# Altium schematic symbol library Schlib1.SchLib: 31 symbols
Pins are listed as number, name and electrical type; pins without a type are passive.

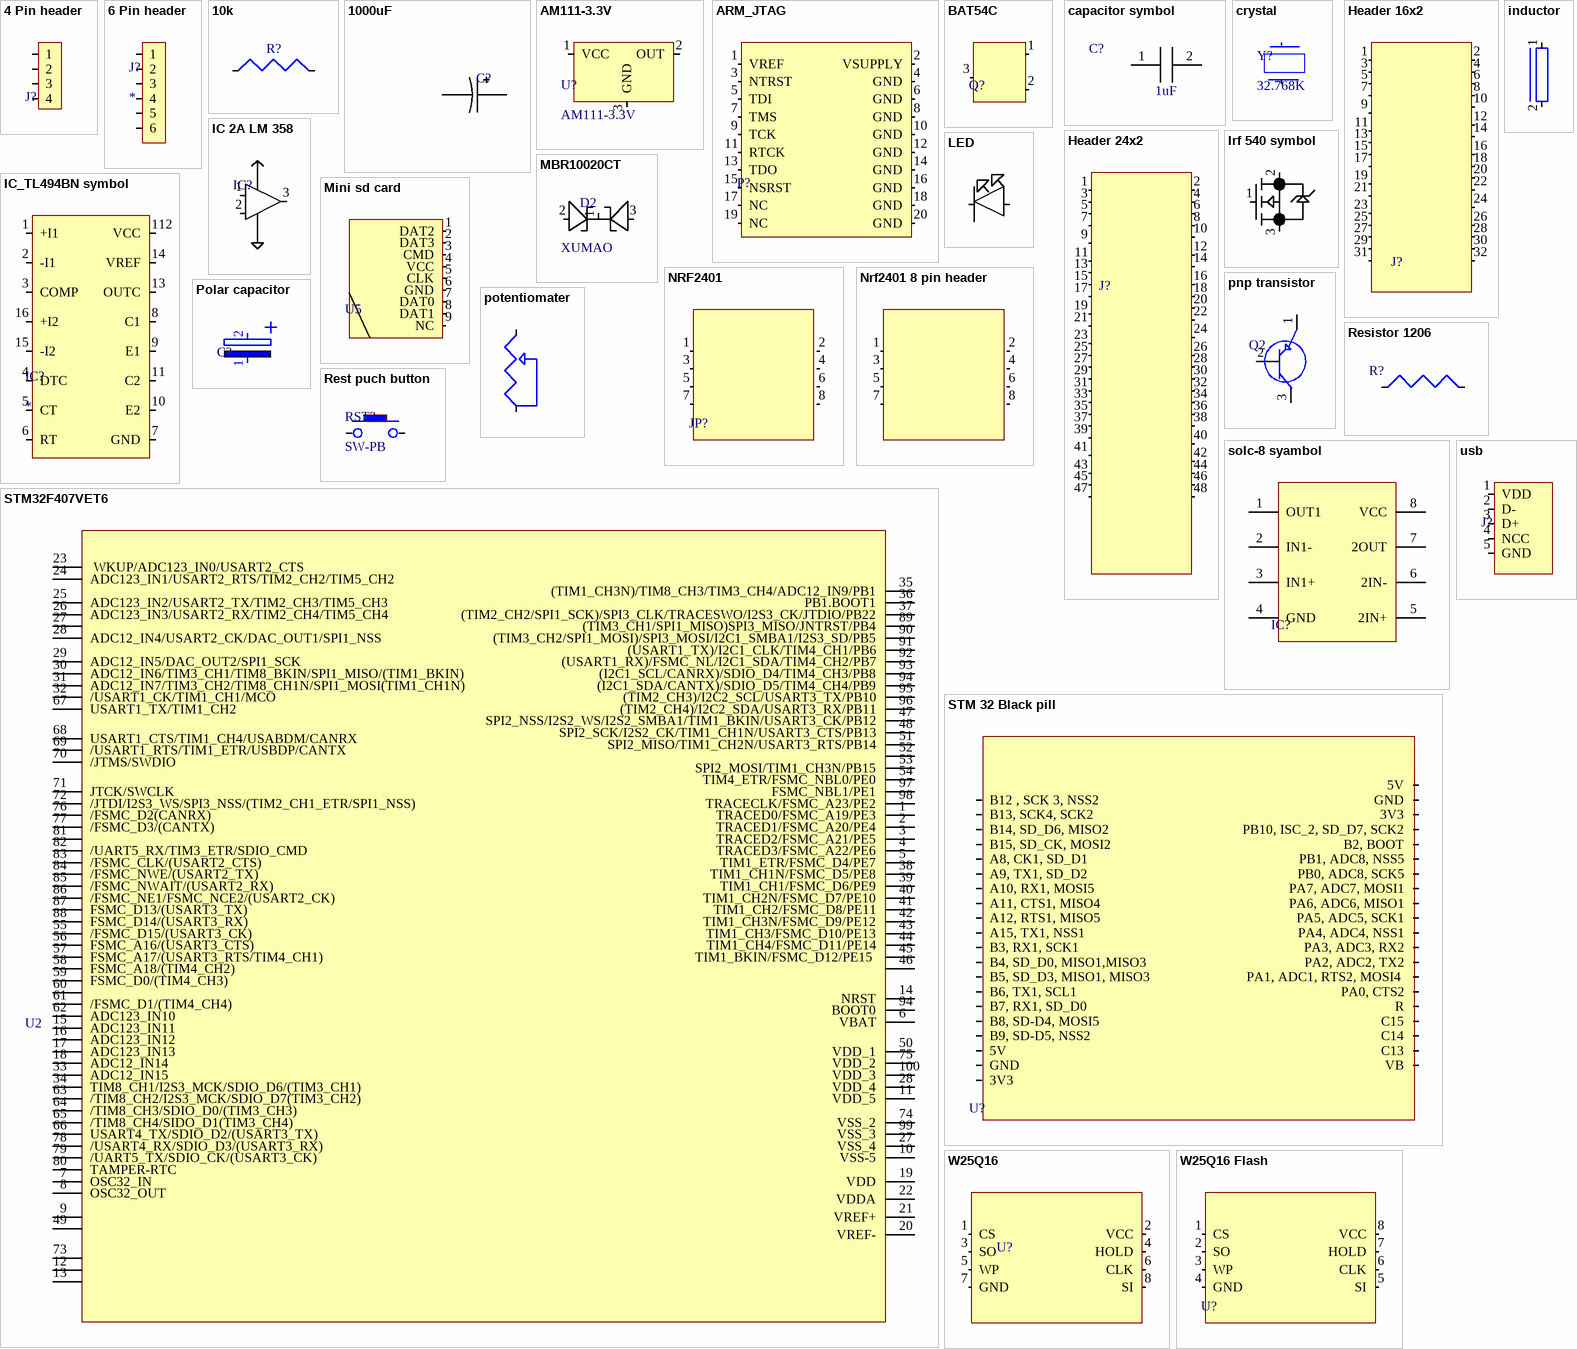
[diagram p0: symbols 4 Pin header to W25Q16 Flash]

## 4 Pin header
designator J?, comment hg  (value not drawn)
footprint 4 pin Headeer stm32
pins: 1, 2, 3, 4

## 6 Pin header
designator J?
footprint 6 pin header STM32
pins: 1, 2, 3, 4, 5, 6

## 10k
designator R?
footprint Resistor
pins: 1, 2

## 1000uF
designator C?
footprint capacitor
pins: 1, 2

## AM111-3.3V
designator U?
footprint AMS1117-3.3V
pins: 1 VCC, 2 OUT, 3 GND

## ARM_JTAG
designator P?, comment 1  (value not drawn)
footprint ARM_JTAG
pins: 1 VREF, 2 VSUPPLY, 3 NTRST, 4 GND, 5 TDI, 6 GND, 7 TMS, 8 GND, 9 TCK, 10 GND, 11 RTCK, 12 GND, 13 TDO, 14 GND, 15 NSRST, 16 GND, 17 NC, 18 GND, 19 NC, 20 GND

## BAT54C
designator Q?, comment 1  (value not drawn)
footprint BAT54C
pins: 1 9, 2, 3 11

## capacitor symbol
designator C?  value 1uF
footprint capacitor
pins: 1, 2

## crystal
designator Y?, comment 32.768K
footprint Crystal
pins: 1, 2

## Header 16x2
designator J?, comment 1  (value not drawn)
footprint Header 16x2
pins: 1, 2, 3, 4, 5, 6, 7, 8, 9, 10, 11, 12, 13, 14, 15, 16, 17, 18, 19, 20, 21, 22, 23, 24, 25, 26, 27, 28, 29, 30, 31, 32

## Header 24x2
designator J?, comment 1  (value not drawn)
footprint Header 24x2
pins: 1, 2, 3, 4, 5, 6, 7, 8, 9, 10, 11, 12, 13, 14, 15, 16, 17, 18, 19, 20, 21, 22, 23, 24, 25, 26, 27, 28, 29, 30, 31, 32, 33, 34, 35, 36, 37, 38, 39, 40, 41, 42, 43, 44, 45, 46, 47, 48

## IC 2A LM 358
designator IC?
Manufacturer: MSKSEMI; Manuf. part #: LM358; Pakage: SOP-8; lcsc part #: C5252902
footprint IC-2A-LM358
pins: 1, 2, 3

## IC_TL494BN symbol
designator IC?
Manufacturer: JSMSEMI; Manufacture part #: TL494; Pakage: SOP-16; lcsc part #: C5356108
footprint TL494BN
pins: 1 +I1, 2 -I1, 3 COMP, 4 DTC, 5 CT, 6 RT, 7 GND, 8 C1, 9 E1, 10 E2, 11 C2, 13 OUTC, 14 VREF, 15 -I2, 16 +I2, 112 VCC

## inductor
designator ?
footprint capacitor
pins: 1, 2

## Irf 540 symbol
designator ?
Mfr. Part #: IRF540NPBF; Manufacturer: Infineon; LCSC Part #: C2566; Package: TO-220AB
footprint IRF 540 through hole
pins: 1, 2, 3

## LED
designator L?
footprint LED
pins: 1, 2

## MBR10020CT
designator D2  Manufacturer: XUMAO  (hidden comment: *)
Mfr. Part #: MBR10200CT; LCSC Part #: C22447875; Package: TO-220AB
footprint IRF 540 through hole
pins: 1, 2, 3

## Mini sd card
designator U5, comment 1  (value not drawn)
footprint SD card reader connector
pins: 1 DAT2, 2 DAT3, 3 CMD, 4 VCC, 5 CLK, 6 GND, 7 DAT0, 8 DAT1, 9 NC

## NRF2401
designator JP?, comment 1  (value not drawn)
footprint 8 pin header
pins: 1 VREF, 2 VSUPPLY, 3 NTRST, 4 GND, 5 TDI, 6 GND, 7 TMS, 8 GND

## Nrf2401 8 pin header
designator JP?  (value not drawn)
footprint 8 pin header
pins: 1 VREF, 2 VSUPPLY, 3 NTRST, 4 GND, 5 TDI, 6 GND, 7 TMS, 8 GND

## pnp transistor
designator Q2, comment 2  (value not drawn)
footprint pnp transistor
pins: 1, 2, 3

## Polar capacitor
designator C?, comment 1  (value not drawn)
footprint capacitor
pins: 1, 2

## potentiomater
designator ?
Mfr. Part #: *AD5262BRUZ20-RL7; Manu: ADI; LCSC Part #: C578157; Package: *
footprint Resistor
pins: 1, 2

## Resistor 1206
designator R?
Manuf: YAGEO; Mfr. Part #: RC1206FR-0710KL; Seller Part #: C132649; Seller: LCSC; Package: 1206
footprint Resistor
pins: 1, 2

## Rest puch button
designator RST?, comment SW-PB
footprint reset push button single
pins: 1, 2

## solc-8 syambol
designator IC?
footprint SOIC-8
pins: 1 OUT1, 2 IN1-, 3 IN1+, 4 GND, 5 2IN+, 6 2IN-, 7 2OUT, 8 VCC

## STM32F407VET6
designator U2, comment 1  (value not drawn)
footprint STM32F407VET6
pins: 1 TRACED0/FSMC_A19/PE3, 2 TRACED1/FSMC_A20/PE4, 3 TRACED2/FSMC_A21/PE5, 4 TRACED3/FSMC_A22/PE6, 5 TIM1_ETR/FSMC_D4/PE7, 6 VBAT, 7 OSC32_IN, 8 OSC32_OUT, 9, 10 VSS-5, 11 VDD_5, 12, 13, 14 NRST, 15 ADC123_IN11, 16 ADC123_IN12, 17 ADC123_IN13, 18 ADC12_IN14, 19 VDD, 20 VREF-, 21 VREF+, 22 VDDA, 23  WKUP/ADC123_IN0/USART2_CTS, 24 ADC123_IN1/USART2_RTS/TIM2_CH2/TIM5_CH2, 25 ADC123_IN2/USART2_TX/TIM2_CH3/TIM5_CH3, 26 ADC123_IN3/USART2_RX/TIM2_CH4/TIM5_CH4, 27 VSS_4, 27, 28 VDD_4, 28 ADC12_IN4/USART2_CK/DAC_OUT1/SPI1_NSS, 29 ADC12_IN5/DAC_OUT2/SPI1_SCK, 30 ADC12_IN6/TIM3_CH1/TIM8_BKIN/SPI1_MISO/(TIM1_BKIN), 31 ADC12_IN7/TIM3_CH2/TIM8_CH1N/SPI1_MOSI(TIM1_CH1N), 32 /USART1_CK/TIM1_CH1/MCO, 33 ADC12_IN15, 34 TIM8_CH1/I2S3_MCK/SDIO_D6/(TIM3_CH1), 35 (TIM1_CH3N)/TIM8_CH3/TIM3_CH4/ADC12_IN9/PB1, 36 PB1.BOOT1, 37 (TIM2_CH2/SPI1_SCK)/SPI3_CLK/TRACESWO/I2S3_CK/JTDIO/PB22, 38 TIM1_CH1N/FSMC_D5/PE8, 39 TIM1_CH1/FSMC_D6/PE9, 40 TIM1_CH2N/FSMC_D7/PE10, 41 TIM1_CH2/FSMC_D8/PE11, 42 TIM1_CH3N/FSMC_D9/PE12, 43 TIM1_CH3/FSMC_D10/PE13, 44 TIM1_CH4/FSMC_D11/PE14, 45 TIM1_BKIN/FSMC_D12/PE15 , 46, 47 SPI2_NSS/I2S2_WS/I2S2_SMBA1/TIM1_BKIN/USART3_CK/PB12, 48 SPI2_SCK/I2S2_CK/TIM1_CH1N/USART3_CTS/PB13, 49, 50 VDD_1, 51 SPI2_MISO/TIM1_CH2N/USART3_RTS/PB14, 52, 53 SPI2_MOSI/TIM1_CH3N/PB15, 54 TIM4_ETR/FSMC_NBL0/PE0, 55 /FSMC_D15/(USART3_CK), 56 FSMC_A16/(USART3_CTS), 57 FSMC_A17/(USART3_RTS/TIM4_CH1), 58 FSMC_A18/(TIM4_CH2), 59 FSMC_D0/(TIM4_CH3), 60, 61 /FSMC_D1/(TIM4_CH4), 62 ADC123_IN10, 63 /TIM8_CH2/I2S3_MCK/SDIO_D7(TIM3_CH2), 64 /TIM8_CH3/SDIO_D0/(TIM3_CH3), 65 /TIM8_CH4/SIDO_D1(TIM3_CH4), 66 USART4_TX/SDIO_D2/(USART3_TX), 67 USART1_TX/TIM1_CH2, 68 USART1_CTS/TIM1_CH4/USABDM/CANRX, 69 /USART1_RTS/TIM1_ETR/USBDP/CANTX, 70 /JTMS/SWDIO, 71 JTCK/SWCLK, 72 /JTDI/I2S3_WS/SPI3_NSS/(TIM2_CH1_ETR/SPI1_NSS), 73, 74 VSS_2, 75 VDD_2, 76 /FSMC_D2(CANRX), 77 /FSMC_D3/(CANTX), 78 /USART4_RX/SDIO_D3/(USART3_RX), 79 /UART5_TX/SDIO_CK/(USART3_CK), 80 TAMPER-RTC, 81, 82 /UART5_RX/TIM3_ETR/SDIO_CMD, 83 /FSMC_CLK/(USART2_CTS), 84 /FSMC_NWE/(USART2_TX), 85 /FSMC_NWAIT/(USART2_RX), 86 /FSMC_NE1/FSMC_NCE2/(USART2_CK), 87 FSMC_D13/(USART3_TX), 88 FSMC_D14/(USART3_RX), 89 (TIM3_CH1/SPI1_MISO)SPI3_MISO/JNTRST/PB4, 90 (TIM3_CH2/SPI1_MOSI)/SPI3_MOSI/I2C1_SMBA1/I2S3_SD/PB5, 91 (USART1_TX)/I2C1_CLK/TIM4_CH1/PB6, 92 (USART1_RX)/FSMC_NL/I2C1_SDA/TIM4_CH2/PB7, 93 (I2C1_SCL/CANRX)/SDIO_D4/TIM4_CH3/PB8, 94 (I2C1_SDA/CANTX)/SDIO_D5/TIM4_CH4/PB9, 94 BOOT0, 95 (TIM2_CH3)/I2C2_SCL/USART3_TX/PB10, 96 (TIM2_CH4)/I2C2_SDA/USART3_RX/PB11, 97 FSMC_NBL1/PE1, 98 TRACECLK/FSMC_A23/PE2, 99 VSS_3, 100 VDD_3

## STM 32 Black pill
designator U?  (value not drawn)
footprint STM 32 Black pill
pins: 1 B12 , SCK 3, NSS2                                                                               , 2 B13, SCK4, SCK2, 3 B14, SD_D6, MISO2, 4 B15, SD_CK, MOSI2, 5 A8, CK1, SD_D1, 6 A9, TX1, SD_D2, 7 A10, RX1, MOSI5, 8 A11, CTS1, MISO4, 9 A12, RTS1, MISO5, 11 A15, TX1, NSS1, 12 B3, RX1, SCK1, 13 B4, SD_D0, MISO1,MISO3, 15 B5, SD_D3, MISO1, MISO3, 16 B6, TX1, SCL1, 17 B7, RX1, SD_D0, 18 B8, SD-D4, MOSI5, 19 5V, 20 GND, 21 3V3, 22 VB, 23 C13, 24 C14, 25 C15, 26 R, 27 PA0, CTS2, 28 PA1, ADC1, RTS2, MOSI4 , 29 PA2, ADC2, TX2, 30 PA3, ADC3, RX2, 32 PA4, ADC4, NSS1, 33 PA5, ADC5, SCK1, 34 PA6, ADC6, MISO1, 35 PA7, ADC7, MOSI1, 36 PB0, ADC8, SCK5, 37 PB1, ADC8, NSS5, 38 B2, BOOT, 39 PB10, ISC_2, SD_D7, SCK2, 40 3V3, 41 GND, 42 5V, 50 B9, SD-D5, NSS2

## usb
designator J?, comment 1  (value not drawn)
footprint USB
pins: 1 VDD, 2 D-, 3 D+, 4 NCC, 5 GND

## W25Q16
designator U?, comment 1  (value not drawn)
footprint W25Q16 Flash
pins: 1 CS, 2 VCC, 3 SO, 4 HOLD, 5 WP, 6 CLK, 7 GND, 8 SI

## W25Q16 Flash
designator U?, comment 1  (value not drawn)
footprint W25Q16 Flash
pins: 1 CS, 2 SO, 3 WP, 4 GND, 5 SI, 6 CLK, 7 HOLD, 8 VCC